# Altium footprint library Diode.PcbLib: 66 footprints (part 2 of 5)
Each footprint in its own frame and in the unit in brackets; x right, y up, seen from the top. Pads: shape width x height; smd on the part's side, far side on the other; paste and mask are expansions set on the pad; w line width, h text height; cw(c..) or ccw(c..) is an arc to the next point about the centre after c.
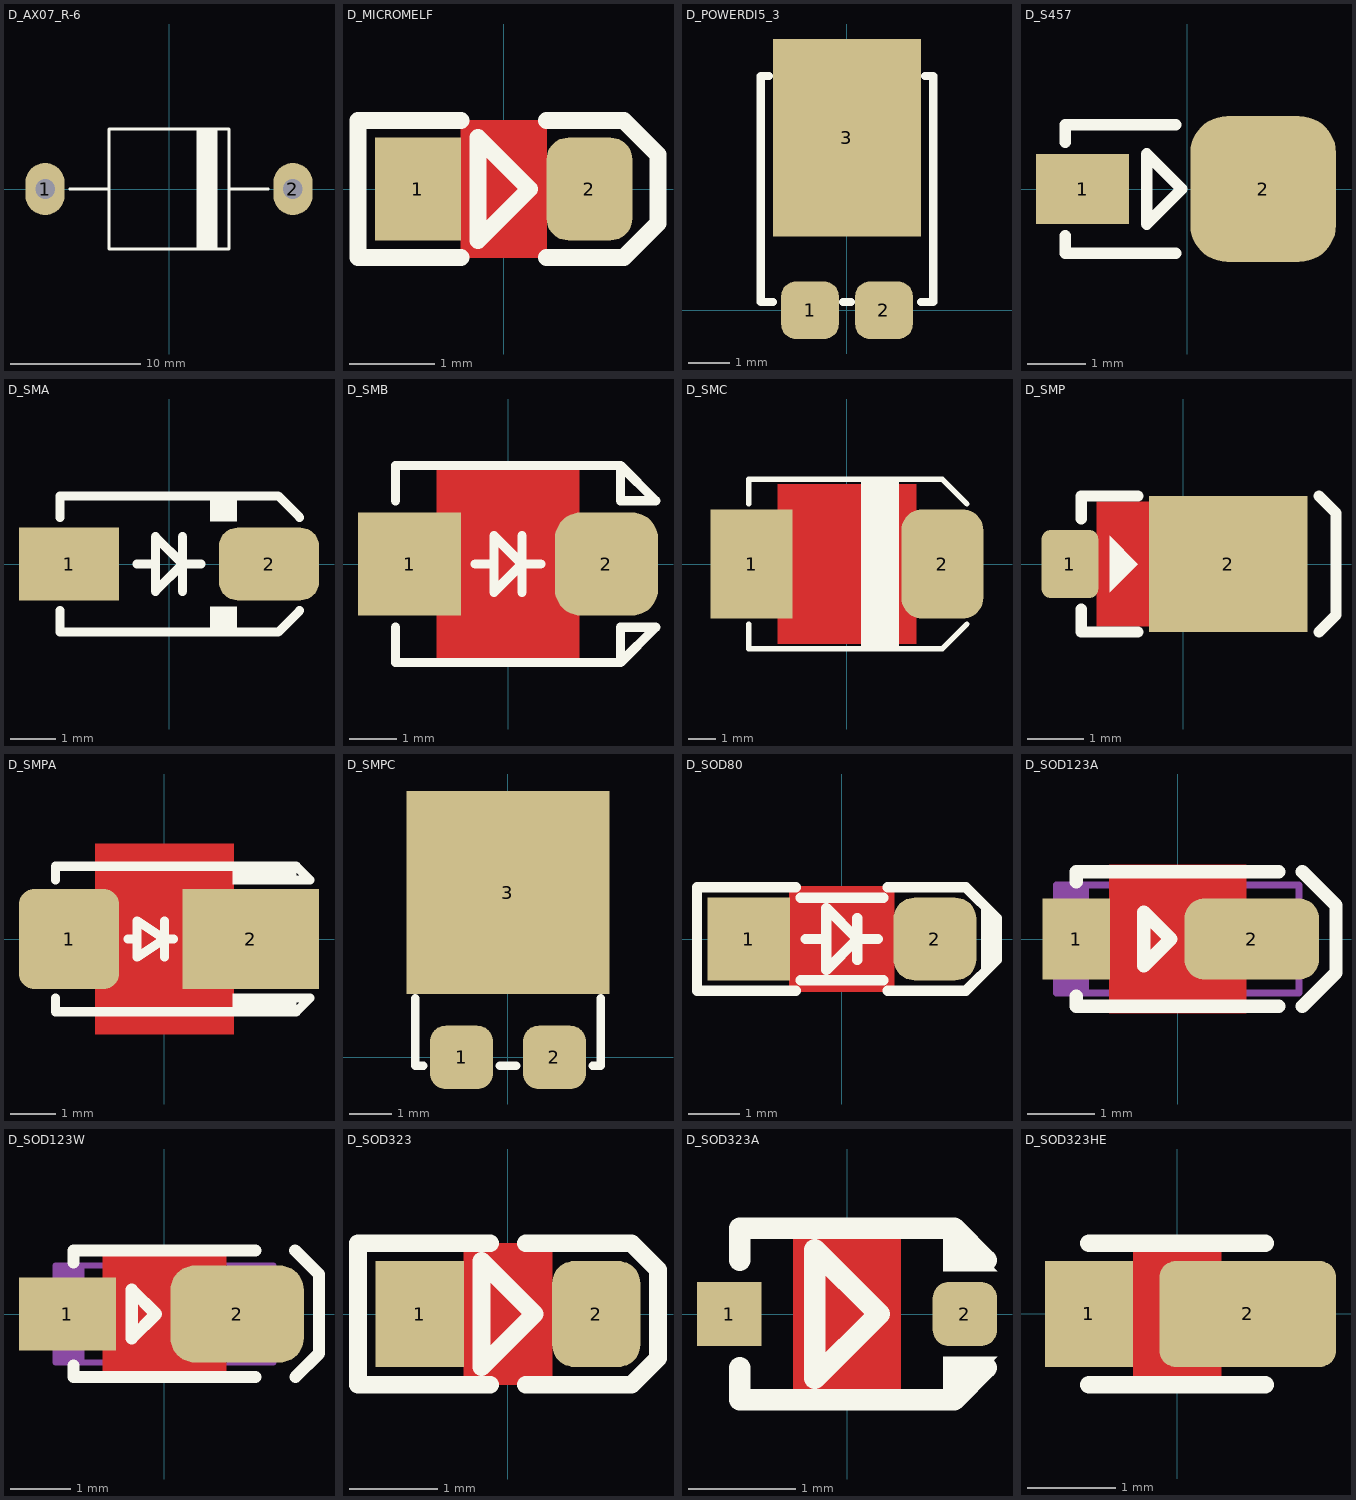
[diagram p1: the footprints below, top view; thin cyan lines are the x and y axes]

## D_AX07_R-6 [mm] "DIODE 0.7 INCH SPACING, R-6"
pads (2):
  oval 3x4 hole 1.5: 1(-9.5,0) 2(9.5,0)
Top Overlay:
  rectangle: 2.1,-4.6 3.7,4.6
  lines w0.2: -7.62,0 -4.6,0 ; 4.6,0 7.62,0 ; -4.6,-4.6 4.6,-4.6 4.6,4.6 -4.6,4.6 -4.6,-4.6
Top Designator:
  text ".Designator" at -3.71,-0.344 h1.52
3D body "10A Shottky diode L19mm.SLDPRT": height 9.55, standoff -1.55, extent -10.15,-4.544 10.15,4.544

## D_MICROMELF [mm] "DIODE0805, SOD323 (PHILIPS), SC-76 (JEITA), DL-35, MicroMELF"
height 1.4
pads (2):
  rect 1x1.2 smd mask+0.075: 1(-1,0)
  rrect50% 1x1.2 smd mask+0.075: 2(1,0)
Top Layer:
  pour cut-out: -0.5,0.8 0.5,0.8 0.5,-0.8 -0.5,-0.8
Top Overlay:
  lines w0.2: -0.5,-0.8 -1.7,-0.8 -1.7,0.8 -0.5,0.8 ; 0.5,-0.8 1.4,-0.8 1.8,-0.4 1.8,0.4 1.4,0.8 0.5,0.8 ; -0.3,-0.6 0.3,0 -0.3,0.6 -0.3,-0.6
Top Designator:
  text ".Designator" at -3.66,-0.344 h1.52
3D body "MICROMELF.stp": height 1.2, standoff 0, extent -1,-0.6 1,0.6

## D_POWERDI5_3 [mm] "POWERDI5, Body 5.5x4.0mm"
pads (3):
  rrect50% 1.4x1.4 smd: 1(-0.9,0) 2(0.9,0)
  rect 3.6x4.8 smd: 3(0,4.2)
Top Overlay:
  lines w0.2: -1.9,5.7 -2.1,5.7 -2.1,0.2 -1.8,0.2 ; -0.1,0.2 0.1,0.2 ; 1.8,0.2 2.1,0.2 2.1,5.7 1.9,5.7
Top Designator:
  text ".Designator" at -3.71,2.606 h1.52
3D body "User Library-PowerDI-5.STEP": height 1.17, standoff 0.02, extent -2.025,-0.3 2.025,6.3

## D_S457 [mm] "CASE457-04 Diode, 2-Leads, Body 2x2mm"
height 2.4
pads (2):
  rect 1.6x1.2 smd: 1(-1.8,0)
  rrect50% 2.5x2.5 smd: 2(1.3,0)
Top Overlay:
  lines w0.2: -2.1,-0.8 -2.1,-1.1 -0.2,-1.1 ; -2.1,0.8 -2.1,1.1 -0.2,1.1 ; -0.7,-0.6 -0.7,0.6 -0.1,0 -0.7,-0.6
Top Designator:
  text ".Designator" at -3.735,-0.344 h1.52
3D body "User Library-Case 457-4.STEP": height 1.18, standoff 0.02, extent -1.95,-1.025 1.95,1.025

## D_SMA [mm] "SMA Molded Diode, 2-Leads, Body 4.3x2.7mm, SOD-128"
height 2.4
pads (2):
  rect 2.2x1.6 smd: 1(-2.2,0)
  rrect50% 2.2x1.6 smd: 2(2.2,0)
Top Overlay:
  rectangle: 0.9,0.94 1.5,1.5
  rectangle: 0.9,-1.5 1.5,-0.94
  lines w0.2: -2.4,-1.025 -2.4,-1.5 2.4,-1.5 2.875,-1.025 ; -2.4,1.025 -2.4,1.5 2.4,1.5 2.875,1.025 ; -0.7,0 -0.3,0 ; 0.3,-0.6 0.3,0.6 ; 0.7,0 0.3,0 ; 0.3,0 -0.3,-0.6 -0.3,0.6 0.3,0
Top Designator:
  text ".Designator" at -3.71,-0.344 h1.52
3D body "User Library-DIOM5528X26.step": height 2.6, standoff 0.03, extent -2.75,-1.4 2.75,1.4

## D_SMB [mm] "SMB Molded Diode, 2-Leads, Body 4.3x3.5mm"
pads (2):
  rect 2.2x2.2 smd: 1(-2.1,0)
  rrect50% 2.2x2.2 smd: 2(2.1,0)
Top Layer:
  pour cut-out: -1.524,2.1 -1.524,-2.1 1.524,-2.1 1.524,2.1
Top Overlay:
  lines w0.2: -2.4,-1.35 -2.4,-2.1 2.4,-2.1 ; -2.4,1.35 -2.4,2.1 2.4,2.1 ; -0.7,0 -0.3,0 ; 0.3,-0.6 0.3,0.6 ; 0.7,0 0.3,0 ; 0.3,0 -0.3,0.6 -0.3,-0.6 0.3,0 ; 2.4,-2.1 3.15,-1.35 2.4,-1.35 2.4,-2.1 ; 2.4,2.1 3.15,1.35 2.4,1.35 2.4,2.1
Top Designator:
  text ".Designator" at -3.71,-0.344 h1.52
3D body "User Library-DIOM5539X24.step": height 2.45, standoff 0.03, extent -2.75,-1.95 2.75,1.95

## D_SMC [mm] "SMC, Molded Diode, 7.0x6.0mm"
height 3
pads (2):
  rect 3x4 smd: 1(-3.5,0)
  rrect50% 3x4 smd: 2(3.5,0)
Top Layer:
  pour cut-out: -2.54,2.921 -2.54,-2.921 2.54,-2.921 2.54,2.921
Top Overlay:
  rectangle: 0.508,-3.048 1.905,3.048
  lines w0.2: -3.6,-2.2 -3.6,-3.1 3.5,-3.1 4.4,-2.2 ; -3.6,2.2 -3.6,3.1 3.5,3.1 4.4,2.2
Top Designator:
  text ".Designator" at -3.71,-0.344 h1.52
3D body "User Library-DIOM8261X24.step": height 2.4, standoff 0.03, extent -4.065,-3.05 4.065,3.05

## D_SMP [mm] "SMP DO-220AA, 2-Leads, Body 3.6x2.1mm"
height 1.2
pads (2):
  rrect30% 1x1.2 smd: 1(-2,0)
  rect 2.8x2.4 smd: 2(0.8,0)
Top Layer:
  pour cut-out: -1.524,1.1 -1.524,-1.1 1.524,-1.1 1.524,1.1
Top Overlay:
  region: -0.8,0 -1.3,0.5 -1.3,-0.5
  lines w0.2: -1.8,-0.8 -1.8,-1.2 -0.8,-1.2 ; -1.8,0.8 -1.8,1.2 -0.8,1.2 ; 2.4,-1.2 2.7,-0.9 2.7,0.9 2.4,1.2
Top Designator:
  text ".Designator" at -3.611,-0.344 h1.52
3D body "DO-220AA_SMP.step": height 1.16, standoff 0, extent -2.231,-1.09 2.105,1.09

## D_SMPA [mm] "SMPA DO-221BC, 2-Leads, Body 5.2x2.6mm"
pads (2):
  rrect30% 2.2x2.2 smd: 1(-2.1,0)
  rect 3x2.2 smd: 2(1.9,0)
Top Layer:
  pour cut-out: -1.524,2.1 -1.524,-2.1 1.524,-2.1 1.524,2.1
Top Overlay:
  rectangle: 1.5,-1.6 2.9,-1.2
  rectangle: 1.5,1.2 2.9,1.6
  lines w0.2: -2.4,-1.3 -2.4,-1.6 2.9,-1.6 3.2,-1.3 2.4,-1.3 2.4,-1.6 ; -2.4,1.3 -2.4,1.6 2.9,1.6 3.2,1.3 2.4,1.3 2.4,1.6 ; -0.8,0 -0.6,0 ; 0,-0.4 0,0.4 ; 0.2,0 0,0 ; 0,0 -0.6,-0.4 -0.6,0.4 0,0
Top Designator:
  text ".Designator" at -3.61,-0.344 h1.52
3D body "User Library-DO-221AC.step": height 1.2, standoff 0, extent -2.8,-1.475 2.8,1.475

## D_SMPC [mm] "SMPC TO-277A, Body 6.1x4.6mm, POWERDI5"
pads (3):
  rrect50% 1.5x1.5 smd: 1(-1.1,0) 2(1.1,0)
  rect 4.8x4.8 smd paste-3: 3(0,3.9)
Top Overlay:
  lines w0.2: -2.2,1.4 -2.2,-0.2 -2,-0.2 ; -0.2,-0.2 0.2,-0.2 ; 2,-0.2 2.2,-0.2 2.2,1.4
Top Paste:
  region: 1.2,5.5 1.2,6.2 0.2,6.2 0.2,5.5
  region: 2.4,5.5 2.4,6.2 1.6,6.2 1.6,5.5
  region: 1.2,5.1 0.2,5.1 0.2,4.1 1.2,4.1
  region: 2.4,5.1 1.6,5.1 1.6,4.1 2.4,4.1
  region: 2.4,3.7 1.6,3.7 1.6,2.7 2.4,2.7
  region: 1.6,2.3 1.6,1.6 2.4,1.6 2.4,2.3
  region: 1.2,3.7 0.2,3.7 0.2,2.7 1.2,2.7
  region: 0.2,2.3 0.2,1.6 1.2,1.6 1.2,2.3
  region: -1.2,2.3 -1.2,1.6 -0.2,1.6 -0.2,2.3
  rectangle: -1.2,2.7 -0.2,3.7
  region: -2.4,2.3 -2.4,1.6 -1.6,1.6 -1.6,2.3
  rectangle: -2.4,2.7 -1.6,3.7
  rectangle: -2.4,4.1 -1.6,5.1
  rectangle: -1.2,4.1 -0.2,5.1
  region: -1.6,5.5 -1.6,6.2 -2.4,6.2 -2.4,5.5
  region: -0.2,5.5 -0.2,6.2 -1.2,6.2 -1.2,5.5
Top Designator:
  text ".Designator" at -3.71,2.431 h1.52
3D body "User Library-TO-277A(SMPC).step": height 1.2, standoff 0, extent -2.375,-0.35 2.375,6.3

## D_SOD80 [mm] "SOD-80 MINI-MELF 3.6X1.6mm, LL-34, LL4148"
height 1.6
pads (2):
  rect 1.6x1.6 smd: 1(-1.8,0)
  rrect50% 1.6x1.6 smd: 2(1.8,0)
Top Layer:
  pour cut-out: -1.016,1.016 1.016,1.016 1.016,-1.016 -1.016,-1.016
Top Overlay:
  region: 2.7,0.7 2.7,-0.7 3,-0.4 3,0.4
  lines w0.2: -0.889,-1 -2.8,-1 -2.8,1 -0.889,1 ; -0.8,-0.8 0.8,-0.8 ; -0.8,0.8 0.8,0.8 ; -0.7,0 -0.3,0 ; 0.3,-0.4 0.3,0.4 ; 0.7,0 0.3,0 ; 0.889,-1 2.4,-1 3,-0.4 3,0.4 2.4,1 0.889,1 ; 0.3,0 -0.3,0.6 -0.3,-0.6 0.3,0
Top Designator:
  text ".Designator" at -3.61,-0.344 h1.52
3D body "User Library-MiniMelf-2.step": height 2, standoff 0.4, extent -1.85,-0.794 1.85,0.794

## D_SOD123A [mm] "PowerDI-123, SOD123, DO-213AA, 1206D"
pads (2):
  rect 1x1.2 smd paste-0.05 mask+0.1: 1(-1.5,0)
  rrect50% 2x1.2 smd paste-0.05 mask+0.1: 2(1.1,0)
Top Layer:
  pour cut-out: -1.016,1.1 -1.016,-1.1 1.016,-1.1 1.016,1.1
Top Overlay:
  lines w0.2: -1.5,-0.85 -1.5,-1 1.5,-1 ; -1.5,0.85 -1.5,1 1.5,1 ; 1.85,-1 2.35,-0.5 2.35,0.5 1.85,1 ; -0.5,-0.4 -0.1,0 -0.5,0.4 -0.5,-0.4
Top Designator:
  text ".Designator" at -3.535,-0.344 h1.52
Mechanical 13:
  region: -1.316,0.8 -1.8,0.8 -1.8,-0.8 -1.316,-0.8
  lines w0.1: -1.8,-0.8 -1.8,0.8 1.8,0.8 1.8,-0.8 -1.8,-0.8
3D body "User Library-POWERDI-123.STEP": height 1, standoff 0, extent -1.95,-0.965 1.95,0.965

## D_SOD123W [mm] "PowerDI-123, SOD123, DO-213AA, 1206D"
pads (2):
  rect 1.6x1.2 smd mask+0.1: 1(-1.6,0)
  rrect50% 2.2x1.6 smd mask+0.1: 2(1.2,0)
Top Layer:
  pour cut-out: -1.016,1.1 -1.016,-1.1 1.016,-1.1 1.016,1.1
Top Overlay:
  lines w0.2: -1.5,-0.85 -1.5,-1.04 1.5,-1.04 ; -1.5,0.85 -1.5,1.05 1.5,1.05 ; 2.155,1.05 2.55,0.655 2.55,-0.65 2.16,-1.04 ; -0.54,-0.4 -0.14,0 -0.54,0.4 -0.54,-0.4
Top Designator:
  text ".Designator" at -3.635,-0.339 h1.52
Mechanical 13:
  region: -1.316,0.8 -1.8,0.8 -1.8,-0.8 -1.316,-0.8
  lines w0.1: -1.8,-0.8 -1.8,0.8 1.8,0.8 1.8,-0.8 -1.8,-0.8
3D body "User Library-POWERDI-123.STEP": height 1, standoff 0, extent -1.95,-0.965 1.95,0.965

## D_SOD323 [mm] "DIODE0805, SOD-323, SC-76, DL-35, 0805 similar size"
height 1.4
pads (2):
  rect 1x1.2 smd mask+0.075: 1(-1,0)
  rrect50% 1x1.2 smd mask+0.075: 2(1,0)
Top Layer:
  pour cut-out: -0.5,0.8 0.5,0.8 0.5,-0.8 -0.5,-0.8
Top Overlay:
  lines w0.2: -0.2,-0.8 -1.7,-0.8 -1.7,0.8 -0.2,0.8 ; 0.2,-0.8 1.4,-0.8 1.7,-0.5 1.7,0.5 1.4,0.8 0.2,0.8 ; -0.3,-0.6 -0.3,0.6 0.3,0 -0.3,-0.6
Top Designator:
  text ".Designator" at -3.71,-0.344 h1.52
3D body "SOD323F.STEP": height 1, standoff 0, extent -1.25,-0.675 1.25,0.675

## D_SOD323A [mm] "DIODE0805, SOD323 (PHILIPS), SC-76 (JEITA), DL-35"
height 1.4
pads (2):
  rect 0.6x0.6 smd mask+0.075: 1(-1.1,0)
  rrect50% 0.6x0.6 smd mask+0.075: 2(1.1,0)
Top Layer:
  pour cut-out: -0.5,0.8 0.5,0.8 0.5,-0.8 -0.5,-0.8
Top Overlay:
  region: 1.4,0.4 0.9,0.4 0.9,0.8 1,0.8
  region: 1.4,-0.4 0.9,-0.4 0.9,-0.8 1,-0.8
  lines w0.2: -1,-0.5 -1,-0.8 1,-0.8 1.3,-0.5 ; -1,0.5 -1,0.8 1,0.8 1.3,0.5 ; -0.3,-0.6 0.3,0 -0.3,0.6 -0.3,-0.6
Top Designator:
  text ".Designator" at -3.71,-0.344 h1.52
3D body "SOD323F.STEP": height 1, standoff 0, extent -1.25,-0.675 1.25,0.675

## D_SOD323HE [mm] "MicroSMP DO-219AD, DIODE0805, SOD-323"
height 0.8
pads (2):
  rect 1x1.2 smd mask+0.075: 1(-1,0)
  rrect30% 2x1.2 smd mask+0.075: 2(0.8,0)
Top Layer:
  pour cut-out: -0.5,0.8 0.5,0.8 0.5,-0.8 -0.5,-0.8
Top Overlay:
  lines w0.2: -1,-0.8 1,-0.8 ; -1,0.8 1,0.8
Top Designator:
  text ".Designator" at -3.56,-0.344 h1.52
3D body "User Library-SOD-323HE.step": height 0.78, standoff 0, extent -1.35,-0.7 1.35,0.7